# Altium schematic symbol library Schlib1.SchLib: 1 symbol
Pins are listed as number, name and electrical type; pins without a type are passive.

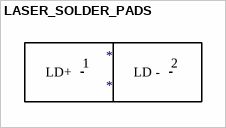
[diagram p0: symbol LASER_SOLDER_PADS]

## LASER_SOLDER_PADS
designator *
footprint PCBComponent_1
pins: 1 LD+, 2 LD -